# Altium footprint library SS24M.PcbLib: 1 footprints
Each footprint in its own frame and in the unit in brackets; x right, y up, seen from the top. Pads: shape width x height; smd on the part's side, far side on the other; paste and mask are expansions set on the pad; w line width, h text height; cw(c..) or ccw(c..) is an arc to the next point about the centre after c.
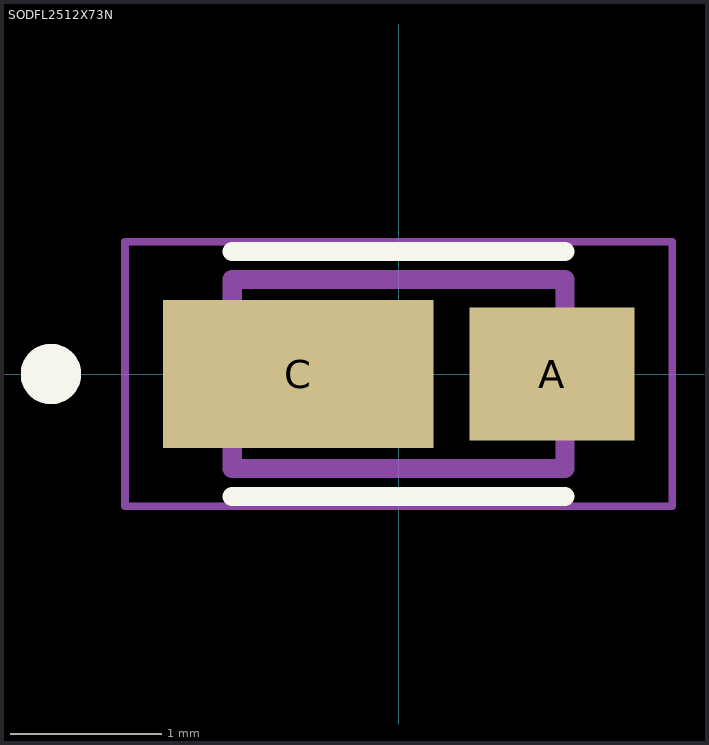
[diagram p0: the footprint, top view; thin cyan lines are the x and y axes]

## SODFL2512X73N [mm]
pads (2):
  rect 1.09x0.88 smd: A(1.015,0)
  rect 1.79x0.98 smd: C(-0.665,0)
Top Overlay:
  circle w0.2: c-2.3,0 r0.1
  lines w0.127: -1.1,-0.81 1.1,-0.81 ; -1.1,0.81 1.1,0.81
Mechanical 13:
  circle w0.2: c-2.3,0 r0.1
  lines w0.127: -1.1,-0.625 1.1,-0.625 1.1,0.625 -1.1,0.625 -1.1,-0.625
Mechanical 15:
  lines w0.05: -1.81,-0.875 -1.81,0.875 1.81,0.875 1.81,-0.875 -1.81,-0.875